# Altium footprint library Conectores.PcbLib: 55 footprints (part 2 of 4)
Each footprint in its own frame and in the unit in brackets; x right, y up, seen from the top. Pads: shape width x height; smd on the part's side, far side on the other; paste and mask are expansions set on the pad; w line width, h text height; cw(c..) or ccw(c..) is an arc to the next point about the centre after c.
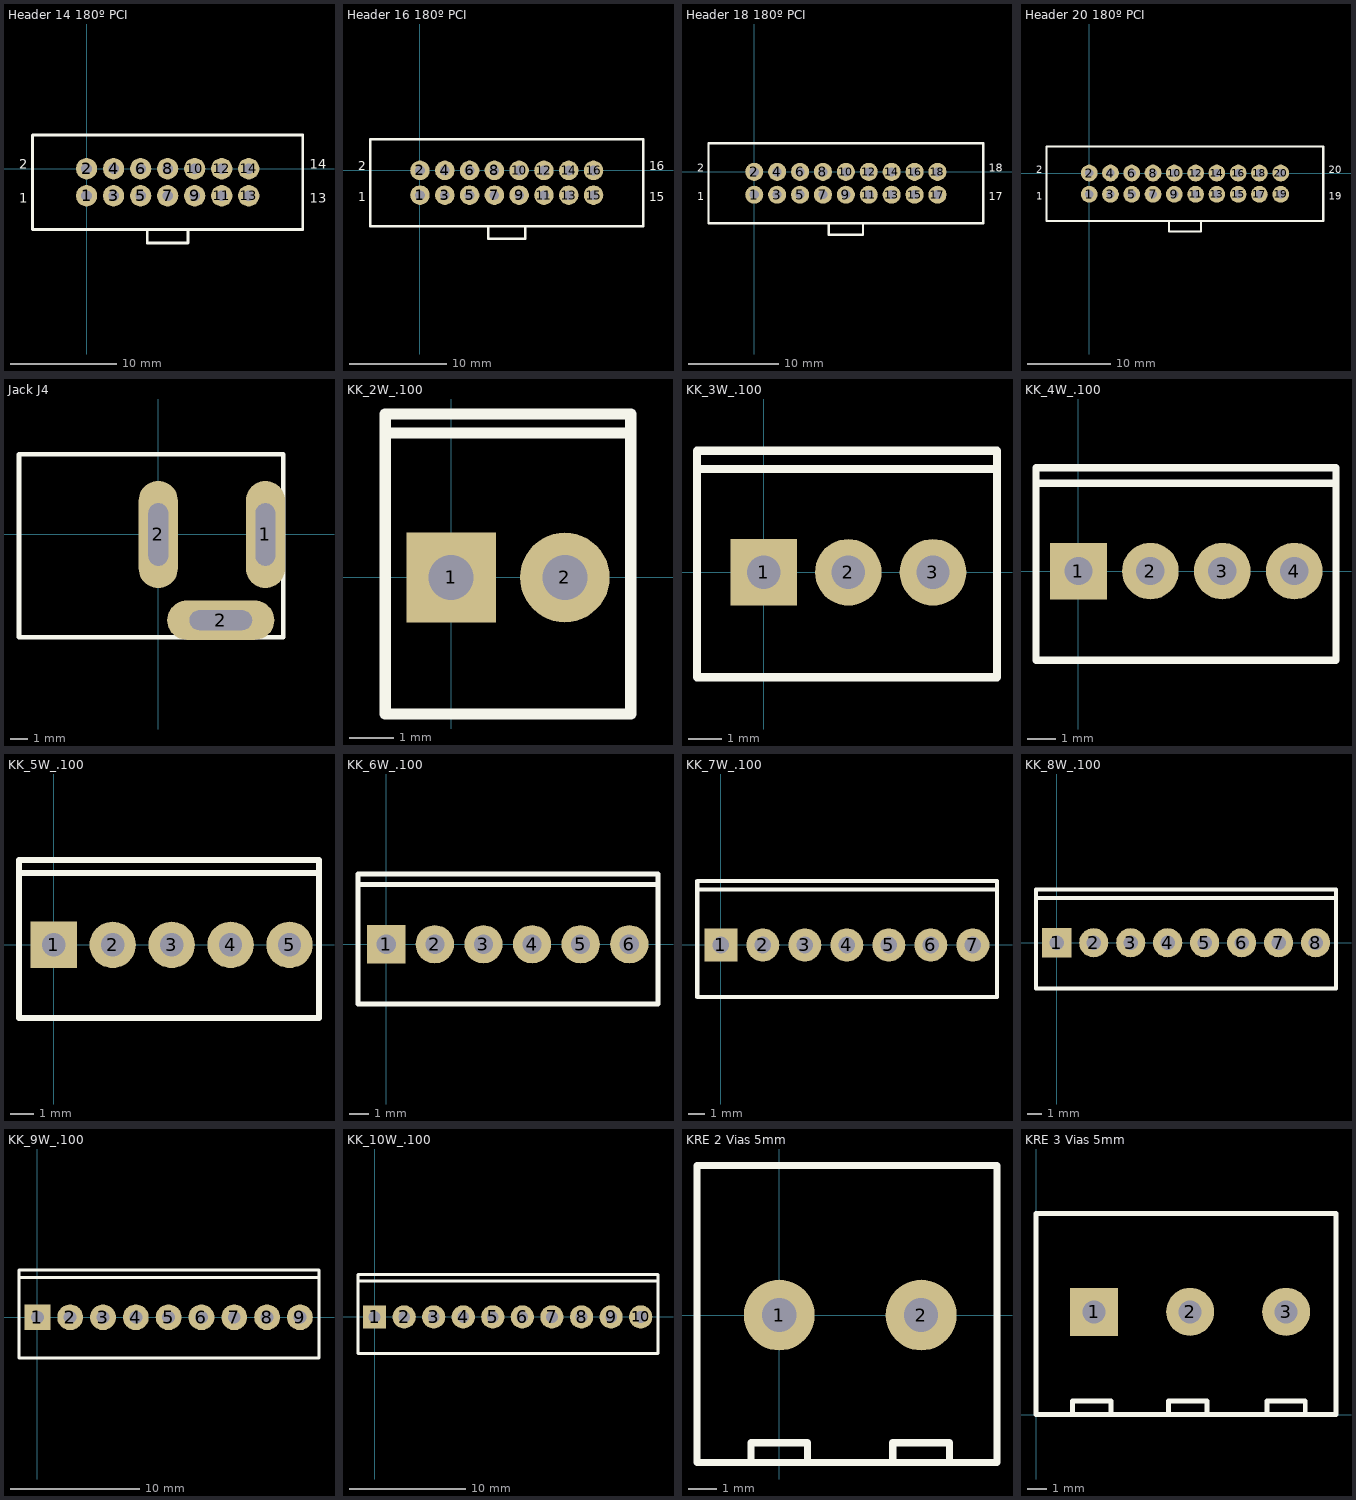
[diagram p1: the footprints below, top view; thin cyan lines are the x and y axes]

## Header 14 180º PCI [mm]
pads (14):
  round 2 hole 1: 1(0,-2.54) 2(0,0) 3(2.54,-2.54) 4(2.54,0) 5(5.08,-2.54) 6(5.08,0) 7(7.62,-2.54) 8(7.62,0) 9(10.16,-2.54) 10(10.16,0) 11(12.7,-2.54) 12(12.7,0) 13(15.24,-2.54) 14(15.24,0)
Top Overlay:
  lines w0.254: 5.715,-5.715 5.715,-6.985 9.525,-6.985 9.525,-5.715 ; -5.08,-5.715 -5.08,3.175 20.32,3.175 20.32,-5.715 -5.08,-5.715
  text "1" at -6.35,-3.175 h0.89
  text "2" at -6.35,0 h0.89
  text "13" at 20.955,-3.175 h0.89
  text "14" at 20.955,0 h0.89
3D body "14 Vias.STEP": height 9.4, standoff -2.9, extent -5.08,-5.618 20.32,3.332

## Header 16 180º PCI [mm]
pads (16):
  round 2 hole 1: 1(0,-2.54) 2(0,0) 3(2.54,-2.54) 4(2.54,0) 5(5.08,-2.54) 6(5.08,0) 7(7.62,-2.54) 8(7.62,0) 9(10.16,-2.54) 10(10.16,0) 11(12.7,-2.54) 12(12.7,0) 13(15.24,-2.54) 14(15.24,0) 15(17.78,-2.54) 16(17.78,0)
Top Overlay:
  lines w0.254: 6.985,-5.715 6.985,-6.985 10.795,-6.985 10.795,-5.715 ; -5.08,-5.715 -5.08,3.175 22.86,3.175 22.86,-5.715 -5.08,-5.715
  text "1" at -6.35,-3.175 h0.89
  text "2" at -6.35,0 h0.89
  text "15" at 23.495,-3.175 h0.89
  text "16" at 23.495,0 h0.89
3D body "16 Vias.STEP": height 9.4, standoff -2.9, extent -5.08,-5.664 22.86,3.286

## Header 18 180º PCI [mm]
pads (18):
  round 2 hole 1: 1(0,-2.54) 2(0,0) 3(2.54,-2.54) 4(2.54,0) 5(5.08,-2.54) 6(5.08,0) 7(7.62,-2.54) 8(7.62,0) 9(10.16,-2.54) 10(10.16,0) 11(12.7,-2.54) 12(12.7,0) 13(15.24,-2.54) 14(15.24,0) 15(17.78,-2.54) 16(17.78,0) 17(20.32,-2.54) 18(20.32,0)
Top Overlay:
  lines w0.254: 8.255,-5.715 8.255,-6.985 12.065,-6.985 12.065,-5.715 ; -5.08,-5.715 -5.08,3.175 25.4,3.175 25.4,-5.715 -5.08,-5.715
  text "18" at 26.035,0 h0.89
  text "17" at 26.035,-3.175 h0.89
  text "2" at -6.35,0 h0.89
  text "1" at -6.35,-3.175 h0.89
3D body "18 Vias.STEP": height 9.4, standoff -2.9, extent -5.08,-5.664 25.4,3.286

## Header 20 180º PCI [mm]
pads (20):
  round 2 hole 1: 1(0,-2.54) 2(0,0) 3(2.54,-2.54) 4(2.54,0) 5(5.08,-2.54) 6(5.08,0) 7(7.62,-2.54) 8(7.62,0) 9(10.16,-2.54) 10(10.16,0) 11(12.7,-2.54) 12(12.7,0) 13(15.24,-2.54) 14(15.24,0) 15(17.78,-2.54) 16(17.78,0) 17(20.32,-2.54) 18(20.32,0) 19(22.86,-2.54) 20(22.86,0)
Top Overlay:
  lines w0.254: 9.525,-5.715 9.525,-6.985 13.335,-6.985 13.335,-5.715 ; -5.08,-5.715 27.94,-5.715 27.94,3.175 -5.08,3.175 -5.08,-5.715
  text "19" at 28.575,-3.175 h0.89
  text "20" at 28.575,0 h0.89
  text "1" at -6.35,-3.175 h0.89
  text "2" at -6.35,0 h0.89
3D body "20 Vias.STEP": height 9.4, standoff -2.9, extent -5.08,-5.664 27.94,3.286

## Jack J4 [mm]
pads (3):
  oval 2.2x6 hole 1.1 slot 3.5 at 90 deg: 1(6,0) 2(0,0)
  oval 6x2.2 hole 1.1 slot 3.5 at 0 deg: 2(3.5,-4.8)
Top Overlay:
  lines w0.254: -7.798,-5.766 -7.798,4.496 7.01,4.496 7.01,-5.766 -7.798,-5.766
3D body "DC JackPT.STEP": height 11.5, standoff -3, extent -7.584,-4.683 6.426,4.327

## KK_2W_.100 [mm]
pads (2):
  rect 2x2 hole 1 unplated: 1(0,0)
  round 2 hole 1 unplated: 2(2.54,0)
Top Overlay:
  lines w0.254: -1.473,3.226 4.013,3.226 ; -1.473,-3.048 4.013,-3.048 4.013,3.65 -1.473,3.65 -1.473,-3.048
3D body "User Library-molex kk 0_1in latching 2 way vertical header.step": height 12.1, standoff -3.14, extent -1.27,-2.946 3.81,2.896

## KK_3W_.100 [mm]
pads (3):
  rect 2x2 hole 1 unplated: 1(0,0)
  round 2 hole 1 unplated: 2(2.54,0) 3(5.08,0)
Top Overlay:
  lines w0.254: -2,3.1 7,3.1 ; -2,-3.15 -2,3.65 7,3.65 7,0.8 7,-3.15 -2,-3.15
3D body "User Library-molex kk 0_1in latching 3 way vertical header.step": height 12.1, standoff -3.14, extent -1.27,-2.972 6.35,2.87

## KK_4W_.100 [mm]
pads (4):
  rect 2x2 hole 1 unplated: 1(0,0)
  round 2 hole 1 unplated: 2(2.54,0) 3(5.08,0) 4(7.62,0)
Top Overlay:
  lines w0.254: -1.473,3.1 9.093,3.1 ; -1.499,-3.15 -1.499,3.65 9.093,3.65 9.093,-3.15 -1.499,-3.15
3D body "User Library-molex kk 0_1in latching 4 way vertical header.step": height 12.1, standoff -3.14, extent -1.245,-2.946 8.915,2.896

## KK_5W_.100 [mm]
pads (5):
  rect 2x2 hole 1 unplated: 1(0,0)
  round 2 hole 1 unplated: 2(2.54,0) 3(5.08,0) 4(7.62,0) 5(10.16,0)
Top Overlay:
  lines w0.254: -1.473,3.1 11.43,3.1 ; -1.499,-3.15 11.43,-3.15 11.43,3.65 -1.499,3.65 -1.499,-3.15
3D body "User Library-molex kk 0_1in latching 5 way vertical header.step": height 12.1, standoff -3.14, extent -1.27,-2.972 11.43,2.87

## KK_6W_.100 [mm]
pads (6):
  rect 2x2 hole 1 unplated: 1(0,0)
  round 2 hole 1 unplated: 2(2.54,0) 3(5.08,0) 4(7.62,0) 5(10.16,0) 6(12.7,0)
Top Overlay:
  lines w0.254: -1.425,3.125 14.175,3.125 ; -1.475,-3.125 14.2,-3.125 14.2,3.675 -1.475,3.675 -1.475,-3.125
3D body "User Library-molex kk 0_1in latching 6 way vertical header.step": height 12.1, standoff -3.14, extent -1.22,-2.972 14.02,2.87

## KK_7W_.100 [mm]
pads (7):
  rect 2x2 hole 1 unplated: 1(0,0)
  round 2 hole 1 unplated: 2(2.54,0) 3(5.08,0) 4(7.62,0) 5(10.16,0) 6(12.7,0) 7(15.24,0)
Top Overlay:
  lines w0.254: -1.441,3.348 16.6,3.348 ; -1.422,-3.15 16.7,-3.15 16.7,3.875 -1.422,3.875 -1.422,-3.15
3D body "22-11-2072.STEP": height 11.08, standoff -3.14, extent -1.27,-3.099 16.51,3.251

## KK_8W_.100 [mm]
pads (8):
  rect 2x2 hole 1 unplated: 1(0,0)
  round 2 hole 1 unplated: 2(2.54,0) 3(5.08,0) 4(7.62,0) 5(10.16,0) 6(12.7,0) 7(15.24,0) 8(17.78,0)
Top Overlay:
  lines w0.254: -1.416,3.073 19.177,3.073 ; -1.422,-3.15 -1.422,3.658 19.177,3.658 19.177,-3.15 -1.422,-3.15
3D body "User Library-molex kk 0_1in latching 8 way vertical header.step": height 12.1, standoff -3.14, extent -1.295,-2.972 19.025,2.87

## KK_9W_.100 [mm]
pads (9):
  rect 2x2 hole 1 unplated: 1(0,0)
  round 2 hole 1 unplated: 2(2.54,0) 3(5.08,0) 4(7.62,0) 5(10.16,0) 6(12.7,0) 7(15.24,0) 8(17.78,0) 9(20.32,0)
Top Overlay:
  lines w0.254: -1.416,3.073 21.8,3.073 ; -1.422,-3.15 21.8,-3.15 21.8,3.658 -1.422,3.658 -1.422,-3.15
3D body "22-23-2091.STEP": height 11.08, standoff -3.14, extent -1.27,-3.099 21.59,3.251

## KK_10W_.100 [mm]
pads (10):
  rect 2x2 hole 1 unplated: 1(0,0)
  round 2 hole 1 unplated: 2(2.54,0) 3(5.08,0) 4(7.62,0) 5(10.16,0) 6(12.7,0) 7(15.24,0) 8(17.78,0) 9(20.32,0) 10(22.86,0)
Top Overlay:
  lines w0.254: -1.416,3.073 24.3,3.073 ; -1.422,-3.15 -1.422,3.658 24.35,3.658 24.35,-3.15 -1.422,-3.15
3D body "User Library-molex kk 0_1in latching 10 way vertical header.step": height 12.1, standoff -3.14, extent -1.25,-2.95 24.15,2.892

## KRE 2 Vias 5mm [mm] "Terminal Block 2 Pos. 5.08mm Pitch"
pads (2):
  round 2.5 hole 1.2: 1(0,0) 2(5,0)
Top Overlay:
  lines w0.254: -1,-5.2 -1,-4.5 1,-4.5 1,-5.2 4,-5.2 4,-4.5 6,-4.5 6,-5.2 ; 5.08,0 5.1,0 ; -2.9,-5.2 7.675,-5.2 7.675,5.275 -2.9,5.275 -2.9,-5.2
3D body "User Library-DG128-5_0-02P-14.STEP": height 14.8, standoff -3, extent -2.725,-5.1 7.575,5.1

## KRE 3 Vias 5mm [mm] "Terminal Block 3 Pos. 5mm Pitch"
pads (3):
  rect 2.5x2.5 hole 1.2: 1(3.025,5.35)
  round 2.5 hole 1.2: 2(8.025,5.35) 3(13.025,5.35)
Top Overlay:
  lines w0.254: 1.9,0 1.9,0.7 3.9,0.7 3.9,0 6.9,0 6.9,0.7 8.9,0.7 8.9,0 ; 8.105,5.35 8.125,5.35 ; 12.025,0 12.025,0.7 14.025,0.7 14.025,0 ; 0,0 15.625,0 15.625,10.475 0,10.475 0,0
3D body "User Library-DG128-5_0-03P-14.step": height 14.6, standoff -3, extent 0.175,0.15 15.475,10.35